# Altium footprint library Random.PcbLib: 21 footprints (part 2 of 2)
Each footprint in its own frame and in the unit in brackets; x right, y up, seen from the top. Pads: shape width x height; smd on the part's side, far side on the other; paste and mask are expansions set on the pad; w line width, h text height; cw(c..) or ccw(c..) is an arc to the next point about the centre after c.
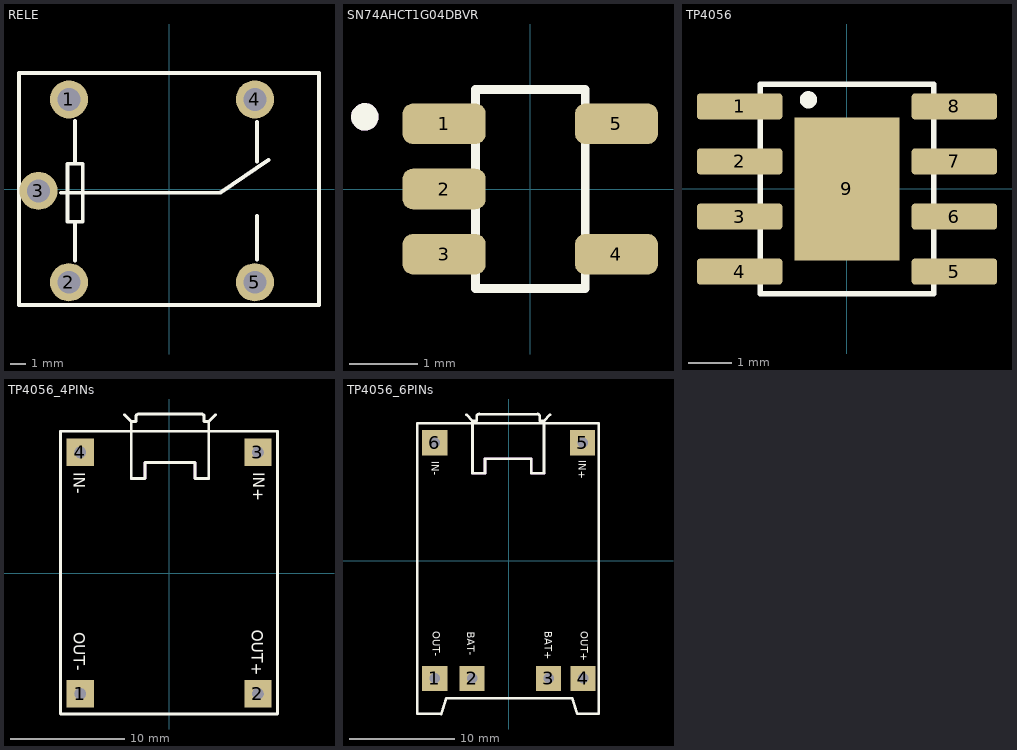
[diagram p1: the footprints below, top view; thin cyan lines are the x and y axes]

## RELE [mm]
pads (5):
  round 2.5 hole 1.5: 1(-6.565,5.88) 2(-6.565,-6.12) 3(-8.565,-0.12) 4(5.635,5.88) 5(5.635,-6.12)
Top Overlay:
  lines w0.254: -7.089,-0.247 3.361,-0.247 6.536,1.912 ; -6.164,-4.694 -6.164,-2.152 ; -6.164,1.658 -6.164,4.454 ; 5.774,-4.645 5.774,-1.771 ; 5.774,1.785 5.774,4.405 ; -9.842,-7.62 -9.842,7.62 9.842,7.62 9.842,-7.62 -9.842,-7.62 ; -6.672,-2.152 -6.672,1.658 -5.656,1.658 -5.656,-2.152 -6.672,-2.152
3D body "RELE.stp": height 15.5, standoff -5, extent -9.737,-7.7 9.864,7.7

## SN74AHCT1G04DBVR [mm] "SOT-23-5"
pads (5):
  rrect50% 1.21x0.59 smd: 1(-1.255,0.95) 2(-1.255,0) 3(-1.255,-0.95) 4(1.255,-0.95) 5(1.255,0.95)
Top Overlay:
  circle w0.2: c-2.41,1.05 r0.1
  lines w0.127: -0.8,-1.45 -0.8,1.45 0.8,1.45 0.8,-1.45 -0.8,-1.45
Mechanical 13:
  circle w0.2: c-2.41,1.05 r0.1
3D body "step_temp.STEP": height 1.45, standoff 0, extent -1.4,-1.45 1.4,1.45

## TP4056 [mm] "SOP-8-EP"
pads (9):
  rrect25% 1.97x0.6 smd: 1(-2.475,1.905) 2(-2.475,0.635) 3(-2.475,-0.635) 4(-2.475,-1.905) 5(2.475,-1.905) 6(2.475,-0.635) 7(2.475,0.635) 8(2.475,1.905)
  rect 2.413x3.302 smd paste-3: 9(0,0)
Top Overlay:
  circle w0.2: c-0.889,2.057 r0.1
  lines w0.127: -2,-2.413 -2,2.413 2,2.413 2,-2.413 -2,-2.413
Top Paste:
  region: 0.645,-0.82 -0.645,-0.82 -0.645,0.82 0.645,0.82
3D body "step_temp.STEP": height 1.75, standoff 0, extent -3,-2.45 3,2.45

## TP4056_4PINs [mm] "MODULE BATTERY CHARGER 4 PINS"
pads (4):
  rect 2.4x2.4 hole 1: 1(-7.81,-10.604) 2(7.81,-10.604) 3(7.81,10.604) 4(-7.81,10.604)
Top Overlay:
  lines w0.254: -3.903,13.914 -3.319,13.33 ; -3.319,9.926 -3.319,8.326 ; -2.912,13.762 -2.912,13.33 -3.319,13.33 ; -2.911,13.776 cw(c-2.676,13.736) -2.663,13.974 ; -2.658,13.965 2.879,13.965 ; 2.887,13.974 cw(c2.85,13.738) 3.088,13.725 ; 3.082,13.711 3.082,13.33 3.489,13.33 ; 3.489,9.926 3.489,8.326 ; 4.073,13.914 3.489,13.33 ; -3.319,8.326 -3.319,12.619 -3.319,13.33 ; -3.319,8.326 -2.125,8.326 -2.125,9.723 2.295,9.723 2.295,8.326 3.489,8.326 ; 3.489,8.326 3.489,12.619 3.489,13.33 ; -9.527,-12.383 9.515,-12.383 9.515,12.458 -9.527,12.458 -9.527,-12.383
  text "OUT+" at 7.252,-4.966 h1
  text "OUT-" at -8.369,-5.22 h1
  text "IN+" at 7.379,8.877 h1
  text "IN-" at -8.369,8.877 h1
Mechanical 15:
  lines w0.254: -3.319,8.326 -2.125,8.326 -2.125,9.723 2.295,9.723 2.295,8.326 3.489,8.326
3D body "TP4056_4PINS.stp": height 5.52, standoff 0, extent -9.652,-12.509 9.525,13.935

## TP4056_6PINs [mm] "MODULE BATTERY CHARGER 6 PINS"
pads (6):
  rect 2.4x2.4 hole 1: 1(-7.068,-11.229) 2(-3.514,-11.229) 3(3.787,-11.229) 4(7.068,-11.229) 5(7.029,11.229) 6(-7.068,11.229)
Top Overlay:
  lines w0.254: -4.049,13.904 -3.465,13.319 ; -3.893,13.071 3.727,13.071 ; -3.465,9.916 -3.465,8.316 ; -3.059,13.751 -3.059,13.319 -3.465,13.319 ; -3.058,13.765 cw(c-2.823,13.725) -2.809,13.964 ; -2.805,13.954 2.732,13.954 ; 2.741,13.964 cw(c2.703,13.728) 2.941,13.715 ; 2.936,13.7 2.936,13.319 3.342,13.319 ; 3.342,9.916 3.342,8.316 ; 3.926,13.904 3.342,13.319 ; -3.465,8.316 -2.271,8.316 -2.271,9.713 2.148,9.713 2.148,8.316 3.342,8.316 ; -3.465,8.316 -3.465,12.608 -3.465,13.319 ; 3.342,8.316 3.342,12.608 3.342,13.319 ; -8.719,-14.613 -8.719,13.071 8.553,13.071 8.553,-14.615 6.536,-14.615 6.051,-13.129 -5.959,-13.129 -6.458,-14.627 -8.719,-14.613
  text "IN+" at 6.637,9.571 h0.7
  text "OUT+" at 6.834,-6.729 h0.7
  text "IN-" at -7.363,9.471 h0.7
  text "OUT-" at -7.263,-6.729 h0.7
  text "BAT-" at -3.981,-6.792 h0.7
  text "BAT+" at 3.434,-6.729 h0.7
Mechanical 15:
  lines w0.254: -3.465,8.316 -2.271,8.316 -2.271,9.713 2.148,9.713 2.148,8.316 3.342,8.316
3D body "TP4056 .step": height 4.22, standoff 0, extent -8.683,-14.586 8.517,13.963